# Altium footprint library WR-PHD_Socket Header.PcbLib: 279 footprints (part 14 of 18)
Each footprint in its own frame and in the unit in brackets; x right, y up, seen from the top. Pads: shape width x height; smd on the part's side, far side on the other; paste and mask are expansions set on the pad; w line width, h text height; cw(c..) or ccw(c..) is an arc to the next point about the centre after c.
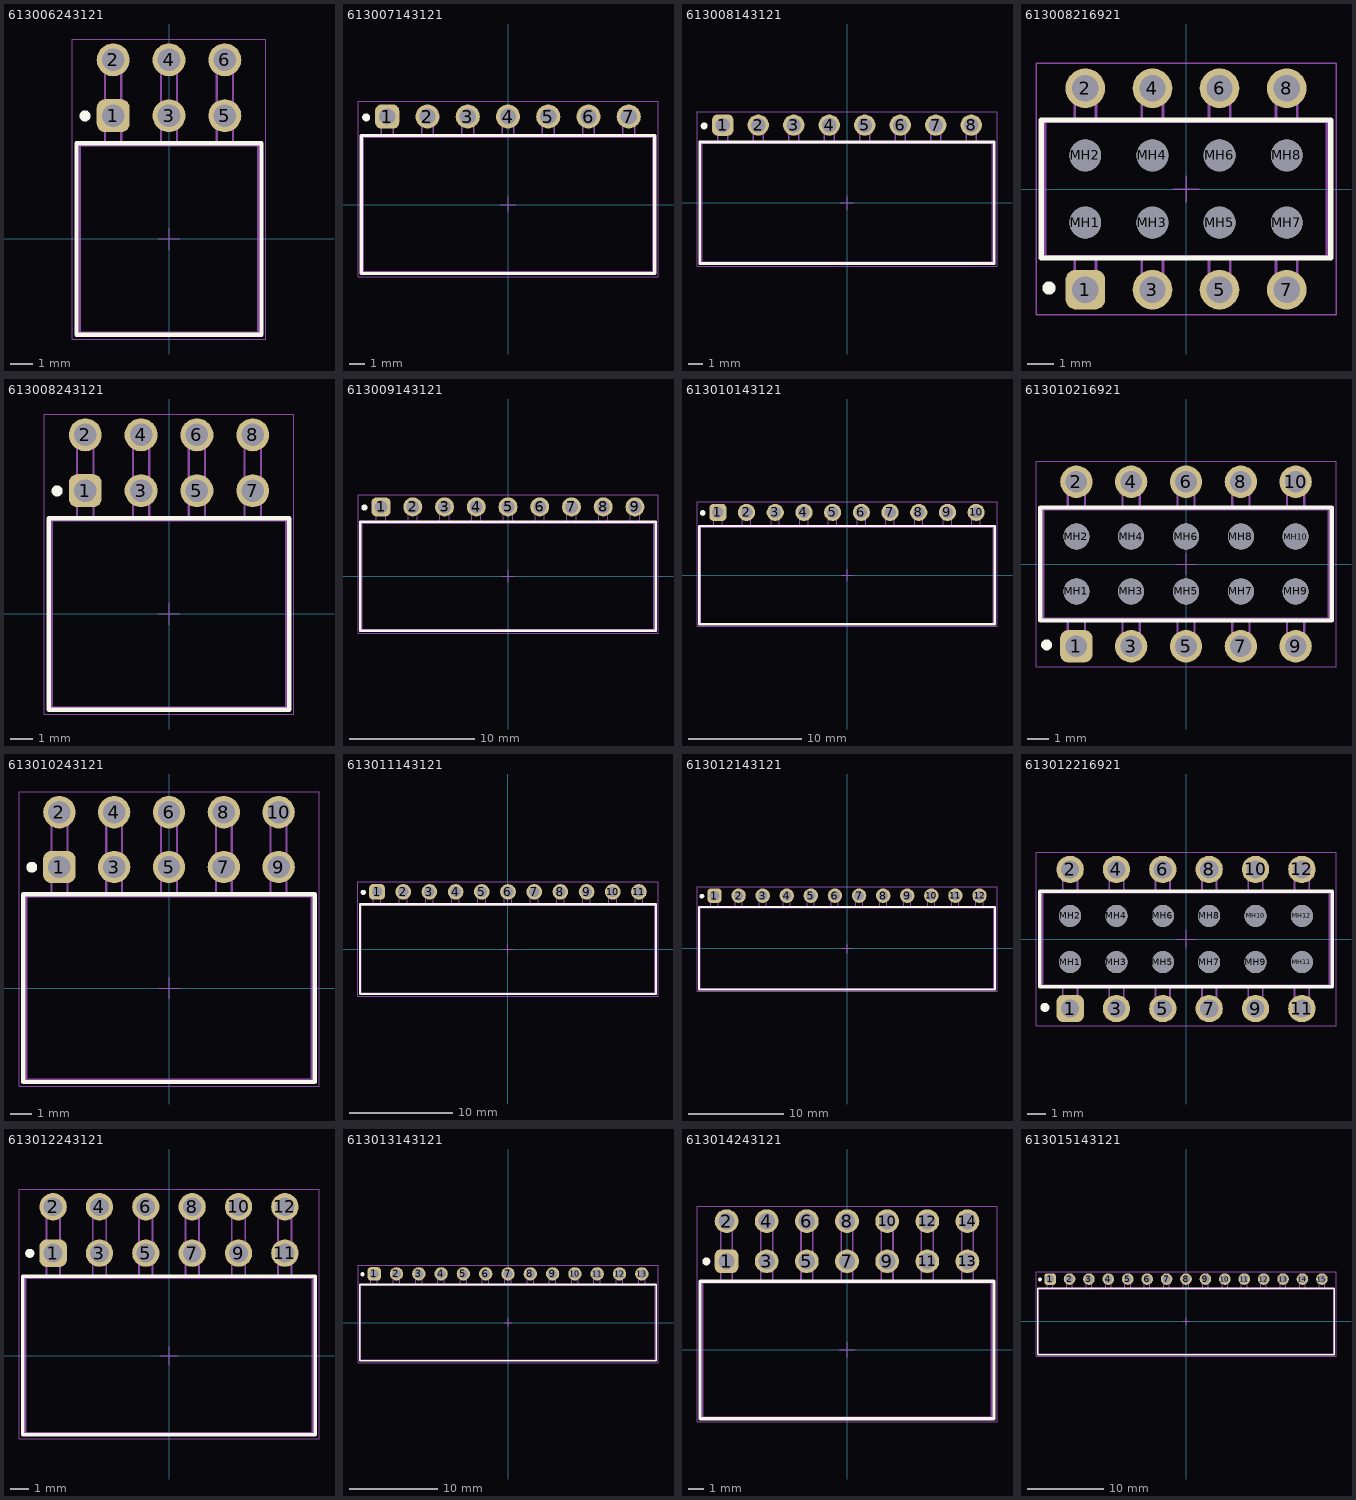
[diagram p13: the footprints below, top view; thin cyan lines are the x and y axes]

## 613006243121 [mm] "Socket Header, Pitch 2.54 mm, THT, Angled, dual row, 6p"
height 5.08
pads (6):
  rrect50% 1.5x1.5 hole 1.03: 1(-2.54,5.61)
  round 1.5 hole 1.03: 2(-2.54,8.15) 3(0,5.61) 4(0,8.15) 5(2.54,5.61) 6(2.54,8.15)
Top Overlay:
  circle w0.25: c-3.82,5.6 r0.125
  lines w0.2: -4.21,-4.35 4.21,-4.35 4.21,4.35 -4.21,4.35 -4.21,-4.35
Top Designator:
  text ".Designator" at -7.498,-0.5 h1.5
Top Component Outline:
  lines w0.1: -2.91,4.25 -2.91,8.35 -2.17,8.35 -2.17,4.25 ; -2.91,5.81 -2.17,5.81 ; -0.37,4.25 -0.37,8.35 0.37,8.35 0.37,4.25 ; -0.37,5.81 0.37,5.81 ; 2.17,4.25 2.17,8.35 2.91,8.35 2.91,4.25 ; 2.17,5.81 2.91,5.81 ; -4.06,-4.25 -4.06,4.25 4.06,4.25 4.06,-4.25 -4.06,-4.25
Top Courtyard:
  lines w0.05: -4.41,-4.55 -4.41,9.1 4.41,9.1 4.41,-4.55 -4.41,-4.55
Top Component Center:
  lines w0.05: -0.5,0 0.5,0 ; 0,-0.5 0,0.5
3D body "613006243121.stp": height 5.05, standoff -3.25, extent -4.06,-4.25 4.06,8.35

## 613007143121 [mm] "Socket Header, Pitch 2.54 mm, THT, Angled, single row, 7p"
height 2.5
pads (7):
  rrect50% 1.52x1.52 hole 1.02: 1(-7.62,5.55)
  round 1.52 hole 1.02: 2(-5.08,5.55) 3(-2.54,5.55) 4(0,5.55) 5(2.54,5.55) 6(5.08,5.55) 7(7.62,5.55)
Top Overlay:
  circle w0.25: c-8.95,5.5 r0.125
  lines w0.2: -9.265,-4.35 -9.265,4.35 9.265,4.35 9.265,-4.35 -9.265,-4.35
Top Designator:
  text ".Designator" at -7.498,-0.5 h1.5
Top Component Outline:
  lines w0.1: -7.99,4.25 -7.99,5.75 -7.25,5.75 -7.25,4.25 ; -5.45,4.25 -5.45,5.75 -4.71,5.75 -4.71,4.25 ; -2.91,4.25 -2.91,5.75 -2.17,5.75 -2.17,4.25 ; -0.37,4.25 -0.37,5.75 0.37,5.75 0.37,4.25 ; 2.17,4.25 2.17,5.75 2.91,5.75 2.91,4.25 ; 4.71,4.25 4.71,5.75 5.45,5.75 5.45,4.25 ; 7.25,4.25 7.25,5.75 7.99,5.75 7.99,4.25 ; -9.14,-4.25 9.14,-4.25 9.14,4.25 -9.14,4.25 -9.14,-4.25
Top Courtyard:
  lines w0.05: -9.465,-4.55 9.465,-4.55 9.465,6.51 -9.465,6.51 -9.465,-4.55
Top Component Center:
  lines w0.05: -0.5,0 0.5,0 ; 0,-0.5 0,0.5
3D body "613007143121.stp": height 2.55, standoff -3.04, extent -9.14,-4.25 9.14,5.75

## 613008143121 [mm] "Socket Header, Pitch 2.54 mm, THT, Angled, single row, 18p"
height 2.5
pads (8):
  rrect50% 1.52x1.52 hole 1.02: 1(-8.89,5.55)
  round 1.52 hole 1.02: 2(-6.35,5.55) 3(-3.81,5.55) 4(-1.27,5.55) 5(1.27,5.55) 6(3.81,5.55) 7(6.35,5.55) 8(8.89,5.55)
Top Overlay:
  circle w0.25: c-10.22,5.5 r0.125
  lines w0.2: -10.535,-4.35 10.535,-4.35 10.535,4.35 -10.535,4.35 -10.535,-4.35
Top Designator:
  text ".Designator" at -7.498,-0.5 h1.5
Top Component Outline:
  lines w0.1: -9.26,4.25 -9.26,5.75 -8.52,5.75 -8.52,4.25 ; -6.72,4.25 -6.72,5.75 -5.98,5.75 -5.98,4.25 ; -4.18,4.25 -4.18,5.75 -3.44,5.75 -3.44,4.25 ; -1.64,4.25 -1.64,5.75 -0.9,5.75 -0.9,4.25 ; 0.9,4.25 0.9,5.75 1.64,5.75 1.64,4.25 ; 3.44,4.25 3.44,5.75 4.18,5.75 4.18,4.25 ; 5.98,4.25 5.98,5.75 6.72,5.75 6.72,4.25 ; 8.52,4.25 8.52,5.75 9.26,5.75 9.26,4.25 ; -10.41,-4.25 10.41,-4.25 10.41,4.25 -10.41,4.25 -10.41,-4.25
Top Courtyard:
  lines w0.05: -10.735,-4.55 -10.735,6.51 10.735,6.51 10.735,-4.55 -10.735,-4.55
Top Component Center:
  lines w0.05: -0.5,0 0.5,0 ; 0,-0.5 0,0.5
3D body "613008143121.stp": height 2.55, standoff -3.04, extent -10.41,-4.25 10.41,5.75

## 613008216921 [mm] "Socket Header, Pitch 2.54 mm, THT, Vertical, dual row, 8p"
height 5
pads (16):
  rrect50% 1.5x1.5 hole 1: 1(-3.81,-3.81)
  round 1.5 hole 1: 2(-3.81,3.81) 3(-1.27,-3.81) 4(-1.27,3.81) 5(1.27,-3.81) 6(1.27,3.81) 7(3.81,-3.81) 8(3.81,3.81)
  round 1.2 hole 1.2 unplated: MH1(-3.81,-1.27) MH2(-3.81,1.27) MH3(-1.27,-1.27) MH4(-1.27,1.27) MH5(1.27,-1.27) MH6(1.27,1.27) MH7(3.81,-1.27) MH8(3.81,1.27)
Top Overlay:
  circle w0.25: c-5.19,-3.75 r0.125
  lines w0.2: -5.48,-2.615 5.48,-2.615 5.48,2.615 -5.48,2.615 -5.48,-2.615
Top Designator:
  text ".Designator" at -7.498,-0.5 h1.5
Top Component Outline:
  lines w0.1: -4.21,-2.54 -4.21,-3.935 -3.41,-3.935 -3.41,-2.54 ; -4.21,2.54 -4.21,3.935 -3.41,3.935 -3.41,2.54 ; -1.67,-2.54 -1.67,-3.935 -0.87,-3.935 -0.87,-2.54 ; -1.67,2.54 -1.67,3.935 -0.87,3.935 -0.87,2.54 ; 0.87,-2.54 0.87,-3.935 1.67,-3.935 1.67,-2.54 ; 0.87,2.54 0.87,3.935 1.67,3.935 1.67,2.54 ; 3.41,-2.54 3.41,-3.935 4.21,-3.935 4.21,-2.54 ; 3.41,2.54 3.41,3.935 4.21,3.935 4.21,2.54 ; -5.33,-2.54 5.33,-2.54 5.33,2.54 -5.33,2.54 -5.33,-2.54
Top Courtyard:
  lines w0.05: -5.68,-4.76 5.68,-4.76 5.68,4.76 -5.68,4.76 -5.68,-4.76
Top Component Center:
  lines w0.05: -0.5,0 0.5,0 ; 0,-0.5 0,0.5
3D body "613008216921.stp": height 5.02, standoff -3.08, extent -5.33,-3.935 5.33,3.935

## 613008243121 [mm] "Socket Header, Pitch 2.54 mm, THT, Angled, dual row, 8p"
height 5.08
pads (8):
  rrect50% 1.5x1.5 hole 1.03: 1(-3.81,5.61)
  round 1.5 hole 1.03: 2(-3.81,8.15) 3(-1.27,5.61) 4(-1.27,8.15) 5(1.27,5.61) 6(1.27,8.15) 7(3.81,5.61) 8(3.81,8.15)
Top Overlay:
  circle w0.25: c-5.09,5.6 r0.125
  lines w0.2: -5.48,-4.35 5.48,-4.35 5.48,4.35 -5.48,4.35 -5.48,-4.35
Top Designator:
  text ".Designator" at -7.498,-0.5 h1.5
Top Component Outline:
  lines w0.1: -4.18,4.25 -4.18,8.35 -3.44,8.35 -3.44,4.25 ; -4.18,5.81 -3.44,5.81 ; -1.64,4.25 -1.64,8.35 -0.9,8.35 -0.9,4.25 ; -1.64,5.81 -0.9,5.81 ; 0.9,4.25 0.9,8.35 1.64,8.35 1.64,4.25 ; 0.9,5.81 1.64,5.81 ; 3.44,4.25 3.44,8.35 4.18,8.35 4.18,4.25 ; 3.44,5.81 4.18,5.81 ; -5.33,-4.25 5.33,-4.25 5.33,4.25 -5.33,4.25 -5.33,-4.25
Top Courtyard:
  lines w0.05: -5.68,-4.55 -5.68,9.1 5.68,9.1 5.68,-4.55 -5.68,-4.55
Top Component Center:
  lines w0.05: -0.5,0 0.5,0 ; 0,-0.5 0,0.5
3D body "613008243121.stp": height 5.05, standoff -3.25, extent -5.33,-4.25 5.33,8.35

## 613009143121 [mm] "Socket Header, Pitch 2.54 mm, THT, Angled, single row, 19p"
height 2.5
pads (9):
  rrect50% 1.52x1.52 hole 1.02: 1(-10.16,5.55)
  round 1.52 hole 1.02: 2(-7.62,5.55) 3(-5.08,5.55) 4(-2.54,5.55) 5(0,5.55) 6(2.54,5.55) 7(5.08,5.55) 8(7.62,5.55) 9(10.16,5.55)
Top Overlay:
  circle w0.25: c-11.49,5.5 r0.125
  lines w0.2: -11.805,-4.35 -11.805,4.35 11.805,4.35 11.805,-4.35 -11.805,-4.35
Top Designator:
  text ".Designator" at -7.498,-0.5 h1.5
Top Component Outline:
  lines w0.1: -10.53,4.25 -10.53,5.75 -9.79,5.75 -9.79,4.25 ; -7.99,4.25 -7.99,5.75 -7.25,5.75 -7.25,4.25 ; -5.45,4.25 -5.45,5.75 -4.71,5.75 -4.71,4.25 ; -2.91,4.25 -2.91,5.75 -2.17,5.75 -2.17,4.25 ; -0.37,4.25 -0.37,5.75 0.37,5.75 0.37,4.25 ; 2.17,4.25 2.17,5.75 2.91,5.75 2.91,4.25 ; 4.71,4.25 4.71,5.75 5.45,5.75 5.45,4.25 ; 7.25,4.25 7.25,5.75 7.99,5.75 7.99,4.25 ; 9.79,4.25 9.79,5.75 10.53,5.75 10.53,4.25 ; -11.68,-4.25 11.68,-4.25 11.68,4.25 -11.68,4.25 -11.68,-4.25
Top Courtyard:
  lines w0.05: -12.005,-4.55 12.005,-4.55 12.005,6.51 -12.005,6.51 -12.005,-4.55
Top Component Center:
  lines w0.05: -0.5,0 0.5,0 ; 0,-0.5 0,0.5
3D body "613009143121.stp": height 2.55, standoff -3.04, extent -11.68,-4.25 11.68,5.75

## 613010143121 [mm] "Socket Header, Pitch 2.54 mm, THT, Angled, single row, 10p"
height 2.5
pads (10):
  rrect50% 1.52x1.52 hole 1.02: 1(-11.43,5.55)
  round 1.52 hole 1.02: 2(-8.89,5.55) 3(-6.35,5.55) 4(-3.81,5.55) 5(-1.27,5.55) 6(1.27,5.55) 7(3.81,5.55) 8(6.35,5.55) 9(8.89,5.55) 10(11.43,5.55)
Top Overlay:
  circle w0.25: c-12.76,5.5 r0.125
  lines w0.2: -13.075,-4.35 13.075,-4.35 13.075,4.35 -13.075,4.35 -13.075,-4.35
Top Designator:
  text ".Designator" at -7.498,-0.5 h1.5
Top Component Outline:
  lines w0.1: -11.8,4.25 -11.8,5.75 -11.06,5.75 -11.06,4.25 ; -9.26,4.25 -9.26,5.75 -8.52,5.75 -8.52,4.25 ; -6.72,4.25 -6.72,5.75 -5.98,5.75 -5.98,4.25 ; -4.18,4.25 -4.18,5.75 -3.44,5.75 -3.44,4.25 ; -1.64,4.25 -1.64,5.75 -0.9,5.75 -0.9,4.25 ; 0.9,4.25 0.9,5.75 1.64,5.75 1.64,4.25 ; 3.44,4.25 3.44,5.75 4.18,5.75 4.18,4.25 ; 5.98,4.25 5.98,5.75 6.72,5.75 6.72,4.25 ; 8.52,4.25 8.52,5.75 9.26,5.75 9.26,4.25 ; 11.06,4.25 11.06,5.75 11.8,5.75 11.8,4.25 ; -12.95,-4.25 12.95,-4.25 12.95,4.25 -12.95,4.25 -12.95,-4.25
Top Courtyard:
  lines w0.05: -13.275,-4.55 -13.275,6.51 13.275,6.51 13.275,-4.55 -13.275,-4.55
Top Component Center:
  lines w0.05: -0.5,0 0.5,0 ; 0,-0.5 0,0.5
3D body "613010143121.stp": height 2.55, standoff -3.04, extent -12.95,-4.25 12.95,5.75

## 613010216921 [mm] "Socket Header, Pitch 2.54 mm, THT, Vertical, dual row, 10p"
height 5
pads (20):
  rrect50% 1.5x1.5 hole 1: 1(-5.08,-3.81)
  round 1.5 hole 1: 2(-5.08,3.81) 3(-2.54,-3.81) 4(-2.54,3.81) 5(0,-3.81) 6(0,3.81) 7(2.54,-3.81) 8(2.54,3.81) 9(5.08,-3.81) 10(5.08,3.81)
  round 1.2 hole 1.2 unplated: MH1(-5.08,-1.27) MH2(-5.08,1.27) MH3(-2.54,-1.27) MH4(-2.54,1.27) MH5(0,-1.27) MH6(0,1.27) MH7(2.54,-1.27) MH8(2.54,1.27) MH9(5.08,-1.27) MH10(5.08,1.27)
Top Overlay:
  circle w0.25: c-6.46,-3.75 r0.125
  lines w0.2: -6.75,-2.615 -6.75,2.615 6.75,2.615 6.75,-2.615 -6.75,-2.615
Top Designator:
  text ".Designator" at -7.498,-0.5 h1.5
Top Component Outline:
  lines w0.1: -5.48,-2.54 -5.48,-3.935 -4.68,-3.935 -4.68,-2.54 ; -5.48,2.54 -5.48,3.935 -4.68,3.935 -4.68,2.54 ; -2.94,-2.54 -2.94,-3.935 -2.14,-3.935 -2.14,-2.54 ; -2.94,2.54 -2.94,3.935 -2.14,3.935 -2.14,2.54 ; -0.4,-2.54 -0.4,-3.935 0.4,-3.935 0.4,-2.54 ; -0.4,2.54 -0.4,3.935 0.4,3.935 0.4,2.54 ; 2.14,-2.54 2.14,-3.935 2.94,-3.935 2.94,-2.54 ; 2.14,2.54 2.14,3.935 2.94,3.935 2.94,2.54 ; 4.68,-2.54 4.68,-3.935 5.48,-3.935 5.48,-2.54 ; 4.68,2.54 4.68,3.935 5.48,3.935 5.48,2.54 ; -6.6,-2.54 6.6,-2.54 6.6,2.54 -6.6,2.54 -6.6,-2.54
Top Courtyard:
  lines w0.05: -6.95,-4.76 -6.95,4.76 6.95,4.76 6.95,-4.76 -6.95,-4.76
Top Component Center:
  lines w0.05: -0.5,0 0.5,0 ; 0,-0.5 0,0.5
3D body "613010216921.stp": height 5.02, standoff -3.08, extent -6.6,-3.935 6.6,3.935

## 613010243121 [mm] "Socket Header, Pitch 2.54 mm, THT, Angled, dual row, 10p"
height 5.08
pads (10):
  rrect50% 1.5x1.5 hole 1.03: 1(-5.08,5.61)
  round 1.5 hole 1.03: 2(-5.08,8.15) 3(-2.54,5.61) 4(-2.54,8.15) 5(0,5.61) 6(0,8.15) 7(2.54,5.61) 8(2.54,8.15) 9(5.08,5.61) 10(5.08,8.15)
Top Overlay:
  circle w0.25: c-6.36,5.6 r0.125
  lines w0.2: -6.75,-4.35 6.75,-4.35 6.75,4.35 -6.75,4.35 -6.75,-4.35
Top Designator:
  text ".Designator" at -7.498,-0.5 h1.5
Top Component Outline:
  lines w0.1: -5.45,4.25 -5.45,8.35 -4.71,8.35 -4.71,4.25 ; -5.45,5.81 -4.71,5.81 ; -2.91,4.25 -2.91,8.35 -2.17,8.35 -2.17,4.25 ; -2.91,5.81 -2.17,5.81 ; -0.37,4.25 -0.37,8.35 0.37,8.35 0.37,4.25 ; -0.37,5.81 0.37,5.81 ; 2.17,4.25 2.17,8.35 2.91,8.35 2.91,4.25 ; 2.17,5.81 2.91,5.81 ; 4.71,4.25 4.71,8.35 5.45,8.35 5.45,4.25 ; 4.71,5.81 5.45,5.81 ; -6.6,-4.25 -6.6,4.25 6.6,4.25 6.6,-4.25 -6.6,-4.25
Top Courtyard:
  lines w0.05: -6.95,-4.55 -6.95,9.1 6.95,9.1 6.95,-4.55 -6.95,-4.55
Top Component Center:
  lines w0.05: -0.5,0 0.5,0 ; 0,-0.5 0,0.5
3D body "613010243121.stp": height 5.05, standoff -3.25, extent -6.6,-4.25 6.6,8.35

## 613011143121 [mm] "Socket Header, Pitch 2.54 mm, THT, Angled, single row, 11p"
height 2.5
pads (11):
  rrect50% 1.52x1.52 hole 1.02: 1(-12.7,5.55)
  round 1.52 hole 1.02: 2(-10.16,5.55) 3(-7.62,5.55) 4(-5.08,5.55) 5(-2.54,5.55) 6(0,5.55) 7(2.54,5.55) 8(5.08,5.55) 9(7.62,5.55) 10(10.16,5.55) 11(12.7,5.55)
Top Overlay:
  circle w0.25: c-14.03,5.5 r0.125
  lines w0.2: -14.345,-4.35 14.345,-4.35 14.345,4.35 -14.345,4.35 -14.345,-4.35
Top Designator:
  text ".Designator" at -7.498,-0.5 h1.5
Top Component Outline:
  lines w0.1: -13.07,4.25 -13.07,5.75 -12.33,5.75 -12.33,4.25 ; -10.53,4.25 -10.53,5.75 -9.79,5.75 -9.79,4.25 ; -7.99,4.25 -7.99,5.75 -7.25,5.75 -7.25,4.25 ; -5.45,4.25 -5.45,5.75 -4.71,5.75 -4.71,4.25 ; -2.91,4.25 -2.91,5.75 -2.17,5.75 -2.17,4.25 ; -0.37,4.25 -0.37,5.75 0.37,5.75 0.37,4.25 ; 2.17,4.25 2.17,5.75 2.91,5.75 2.91,4.25 ; 4.71,4.25 4.71,5.75 5.45,5.75 5.45,4.25 ; 7.25,4.25 7.25,5.75 7.99,5.75 7.99,4.25 ; 9.79,4.25 9.79,5.75 10.53,5.75 10.53,4.25 ; 12.33,4.25 12.33,5.75 13.07,5.75 13.07,4.25 ; -14.22,-4.25 14.22,-4.25 14.22,4.25 -14.22,4.25 -14.22,-4.25
Top Courtyard:
  lines w0.05: -14.545,-4.55 -14.545,6.51 14.545,6.51 14.545,-4.55 -14.545,-4.55
Top Component Center:
  lines w0.05: -0.5,0 0.5,0 ; 0,-0.5 0,0.5
3D body "613011143121.stp": height 2.55, standoff -3.04, extent -14.22,-4.25 14.22,5.75

## 613012143121 [mm] "Socket Header, Pitch 2.54 mm, THT, Angled, single row, 12p"
height 2.5
pads (12):
  rrect50% 1.52x1.52 hole 1.02: 1(-13.97,5.55)
  round 1.52 hole 1.02: 2(-11.43,5.55) 3(-8.89,5.55) 4(-6.35,5.55) 5(-3.81,5.55) 6(-1.27,5.55) 7(1.27,5.55) 8(3.81,5.55) 9(6.35,5.55) 10(8.89,5.55) 11(11.43,5.55) 12(13.97,5.55)
Top Overlay:
  circle w0.25: c-15.3,5.5 r0.125
  lines w0.2: -15.615,-4.35 -15.615,4.35 15.615,4.35 15.615,-4.35 -15.615,-4.35
Top Designator:
  text ".Designator" at -7.498,-0.5 h1.5
Top Component Outline:
  lines w0.1: -14.34,4.25 -14.34,5.75 -13.6,5.75 -13.6,4.25 ; -11.8,4.25 -11.8,5.75 -11.06,5.75 -11.06,4.25 ; -9.26,4.25 -9.26,5.75 -8.52,5.75 -8.52,4.25 ; -6.72,4.25 -6.72,5.75 -5.98,5.75 -5.98,4.25 ; -4.18,4.25 -4.18,5.75 -3.44,5.75 -3.44,4.25 ; -1.64,4.25 -1.64,5.75 -0.9,5.75 -0.9,4.25 ; 0.9,4.25 0.9,5.75 1.64,5.75 1.64,4.25 ; 3.44,4.25 3.44,5.75 4.18,5.75 4.18,4.25 ; 5.98,4.25 5.98,5.75 6.72,5.75 6.72,4.25 ; 8.52,4.25 8.52,5.75 9.26,5.75 9.26,4.25 ; 11.06,4.25 11.06,5.75 11.8,5.75 11.8,4.25 ; 13.6,4.25 13.6,5.75 14.34,5.75 14.34,4.25 ; -15.49,-4.25 15.49,-4.25 15.49,4.25 -15.49,4.25 -15.49,-4.25
Top Courtyard:
  lines w0.05: -15.815,-4.55 15.815,-4.55 15.815,6.51 -15.815,6.51 -15.815,-4.55
Top Component Center:
  lines w0.05: -0.5,0 0.5,0 ; 0,-0.5 0,0.5
3D body "613012143121.stp": height 2.55, standoff -3.04, extent -15.49,-4.25 15.49,5.75

## 613012216921 [mm] "Socket Header, Pitch 2.54 mm, THT, Vertical, dual row, 12p"
height 5
pads (24):
  rrect50% 1.5x1.5 hole 1: 1(-6.35,-3.81)
  round 1.5 hole 1: 2(-6.35,3.81) 3(-3.81,-3.81) 4(-3.81,3.81) 5(-1.27,-3.81) 6(-1.27,3.81) 7(1.27,-3.81) 8(1.27,3.81) 9(3.81,-3.81) 10(3.81,3.81) 11(6.35,-3.81) 12(6.35,3.81)
  round 1.2 hole 1.2 unplated: MH1(-6.35,-1.27) MH2(-6.35,1.27) MH3(-3.81,-1.27) MH4(-3.81,1.27) MH5(-1.27,-1.27) MH6(-1.27,1.27) MH7(1.27,-1.27) MH8(1.27,1.27) MH9(3.81,-1.27) MH10(3.81,1.27) MH11(6.35,-1.27) MH12(6.35,1.27)
Top Overlay:
  circle w0.25: c-7.73,-3.75 r0.125
  lines w0.2: -8.02,-2.615 -8.02,2.615 8.02,2.615 8.02,-2.615 -8.02,-2.615
Top Designator:
  text ".Designator" at -7.498,-0.5 h1.5
Top Component Outline:
  lines w0.1: -6.75,-2.54 -6.75,-3.935 -5.95,-3.935 -5.95,-2.54 ; -6.75,2.54 -6.75,3.935 -5.95,3.935 -5.95,2.54 ; -4.21,-2.54 -4.21,-3.935 -3.41,-3.935 -3.41,-2.54 ; -4.21,2.54 -4.21,3.935 -3.41,3.935 -3.41,2.54 ; -1.67,-2.54 -1.67,-3.935 -0.87,-3.935 -0.87,-2.54 ; -1.67,2.54 -1.67,3.935 -0.87,3.935 -0.87,2.54 ; 0.87,-2.54 0.87,-3.935 1.67,-3.935 1.67,-2.54 ; 0.87,2.54 0.87,3.935 1.67,3.935 1.67,2.54 ; 3.41,-2.54 3.41,-3.935 4.21,-3.935 4.21,-2.54 ; 3.41,2.54 3.41,3.935 4.21,3.935 4.21,2.54 ; 5.95,-2.54 5.95,-3.935 6.75,-3.935 6.75,-2.54 ; 5.95,2.54 5.95,3.935 6.75,3.935 6.75,2.54 ; -7.87,-2.54 -7.87,2.54 7.87,2.54 7.87,-2.54 -7.87,-2.54
Top Courtyard:
  lines w0.05: -8.22,-4.76 -8.22,4.76 8.22,4.76 8.22,-4.76 -8.22,-4.76
Top Component Center:
  lines w0.05: -0.5,0 0.5,0 ; 0,-0.5 0,0.5
3D body "613012216921.stp": height 5.02, standoff -3.08, extent -7.87,-3.935 7.87,3.935

## 613012243121 [mm] "Socket Header, Pitch 2.54 mm, THT, Angled, dual row, 12p"
height 5.08
pads (12):
  rrect50% 1.5x1.5 hole 1.03: 1(-6.35,5.61)
  round 1.5 hole 1.03: 2(-6.35,8.15) 3(-3.81,5.61) 4(-3.81,8.15) 5(-1.27,5.61) 6(-1.27,8.15) 7(1.27,5.61) 8(1.27,8.15) 9(3.81,5.61) 10(3.81,8.15) 11(6.35,5.61) 12(6.35,8.15)
Top Overlay:
  circle w0.25: c-7.63,5.6 r0.125
  lines w0.2: -8.02,-4.35 -8.02,4.35 8.02,4.35 8.02,-4.35 -8.02,-4.35
Top Designator:
  text ".Designator" at -7.498,-0.5 h1.5
Top Component Outline:
  lines w0.1: -6.72,4.25 -6.72,8.35 -5.98,8.35 -5.98,4.25 ; -6.72,5.81 -5.98,5.81 ; -4.18,4.25 -4.18,8.35 -3.44,8.35 -3.44,4.25 ; -4.18,5.81 -3.44,5.81 ; -1.64,4.25 -1.64,8.35 -0.9,8.35 -0.9,4.25 ; -1.64,5.81 -0.9,5.81 ; 0.9,4.25 0.9,8.35 1.64,8.35 1.64,4.25 ; 0.9,5.81 1.64,5.81 ; 3.44,4.25 3.44,8.35 4.18,8.35 4.18,4.25 ; 3.44,5.81 4.18,5.81 ; 5.98,4.25 5.98,8.35 6.72,8.35 6.72,4.25 ; 5.98,5.81 6.72,5.81 ; -7.87,-4.25 -7.87,4.25 7.87,4.25 7.87,-4.25 -7.87,-4.25
Top Courtyard:
  lines w0.05: -8.22,-4.55 8.22,-4.55 8.22,9.1 -8.22,9.1 -8.22,-4.55
Top Component Center:
  lines w0.05: -0.5,0 0.5,0 ; 0,-0.5 0,0.5
3D body "613012243121.stp": height 5.05, standoff -3.25, extent -7.87,-4.25 7.87,8.35

## 613013143121 [mm] "Socket Header, Pitch 2.54 mm, THT, Angled, single row, 13p"
height 2.5
pads (13):
  rrect50% 1.52x1.52 hole 1.02: 1(-15.24,5.55)
  round 1.52 hole 1.02: 2(-12.7,5.55) 3(-10.16,5.55) 4(-7.62,5.55) 5(-5.08,5.55) 6(-2.54,5.55) 7(0,5.55) 8(2.54,5.55) 9(5.08,5.55) 10(7.62,5.55) 11(10.16,5.55) 12(12.7,5.55) 13(15.24,5.55)
Top Overlay:
  circle w0.25: c-16.57,5.5 r0.125
  lines w0.2: -16.885,-4.35 -16.885,4.35 16.885,4.35 16.885,-4.35 -16.885,-4.35
Top Designator:
  text ".Designator" at -7.498,-0.5 h1.5
Top Component Outline:
  lines w0.1: -15.61,4.25 -15.61,5.75 -14.87,5.75 -14.87,4.25 ; -13.07,4.25 -13.07,5.75 -12.33,5.75 -12.33,4.25 ; -10.53,4.25 -10.53,5.75 -9.79,5.75 -9.79,4.25 ; -7.99,4.25 -7.99,5.75 -7.25,5.75 -7.25,4.25 ; -5.45,4.25 -5.45,5.75 -4.71,5.75 -4.71,4.25 ; -2.91,4.25 -2.91,5.75 -2.17,5.75 -2.17,4.25 ; -0.37,4.25 -0.37,5.75 0.37,5.75 0.37,4.25 ; 2.17,4.25 2.17,5.75 2.91,5.75 2.91,4.25 ; 4.71,4.25 4.71,5.75 5.45,5.75 5.45,4.25 ; 7.25,4.25 7.25,5.75 7.99,5.75 7.99,4.25 ; 9.79,4.25 9.79,5.75 10.53,5.75 10.53,4.25 ; 12.33,4.25 12.33,5.75 13.07,5.75 13.07,4.25 ; 14.87,4.25 14.87,5.75 15.61,5.75 15.61,4.25 ; -16.76,-4.25 -16.76,4.25 16.76,4.25 16.76,-4.25 -16.76,-4.25
Top Courtyard:
  lines w0.05: -17.085,-4.55 17.085,-4.55 17.085,6.51 -17.085,6.51 -17.085,-4.55
Top Component Center:
  lines w0.05: -0.5,0 0.5,0 ; 0,-0.5 0,0.5
3D body "613013143121.stp": height 2.55, standoff -3.04, extent -16.76,-4.25 16.26,5.75

## 613014243121 [mm] "Socket Header, Pitch 2.54 mm, THT, Angled, dual row, 14p"
height 5.08
pads (14):
  rrect50% 1.5x1.5 hole 1.03: 1(-7.62,5.61)
  round 1.5 hole 1.03: 2(-7.62,8.15) 3(-5.08,5.61) 4(-5.08,8.15) 5(-2.54,5.61) 6(-2.54,8.15) 7(0,5.61) 8(0,8.15) 9(2.54,5.61) 10(2.54,8.15) 11(5.08,5.61) 12(5.08,8.15) 13(7.62,5.61) 14(7.62,8.15)
Top Overlay:
  circle w0.25: c-8.9,5.6 r0.125
  lines w0.2: -9.29,-4.35 9.29,-4.35 9.29,4.35 -9.29,4.35 -9.29,-4.35
Top Designator:
  text ".Designator" at -7.498,-0.5 h1.5
Top Component Outline:
  lines w0.1: -7.99,4.25 -7.99,8.35 -7.25,8.35 -7.25,4.25 ; -7.99,5.81 -7.25,5.81 ; -5.45,4.25 -5.45,8.35 -4.71,8.35 -4.71,4.25 ; -5.45,5.81 -4.71,5.81 ; -2.91,4.25 -2.91,8.35 -2.17,8.35 -2.17,4.25 ; -2.91,5.81 -2.17,5.81 ; -0.37,4.25 -0.37,8.35 0.37,8.35 0.37,4.25 ; -0.37,5.81 0.37,5.81 ; 2.17,4.25 2.17,8.35 2.91,8.35 2.91,4.25 ; 2.17,5.81 2.91,5.81 ; 4.71,4.25 4.71,8.35 5.45,8.35 5.45,4.25 ; 4.71,5.81 5.45,5.81 ; 7.25,4.25 7.25,8.35 7.99,8.35 7.99,4.25 ; 7.25,5.81 7.99,5.81 ; -9.14,-4.25 -9.14,4.25 9.14,4.25 9.14,-4.25 -9.14,-4.25
Top Courtyard:
  lines w0.05: -9.49,-4.55 -9.49,9.1 9.49,9.1 9.49,-4.55 -9.49,-4.55
Top Component Center:
  lines w0.05: -0.5,0 0.5,0 ; 0,-0.5 0,0.5
3D body "613014243121.stp": height 5.05, standoff -3.25, extent -9.14,-4.25 9.14,8.35

## 613015143121 [mm] "Socket Header, Pitch 2.54 mm, THT, Angled, single row, 15p"
height 2.5
pads (15):
  rrect50% 1.52x1.52 hole 1.02: 1(-17.78,5.55)
  round 1.52 hole 1.02: 2(-15.24,5.55) 3(-12.7,5.55) 4(-10.16,5.55) 5(-7.62,5.55) 6(-5.08,5.55) 7(-2.54,5.55) 8(0,5.55) 9(2.54,5.55) 10(5.08,5.55) 11(7.62,5.55) 12(10.16,5.55) 13(12.7,5.55) 14(15.24,5.55) 15(17.78,5.55)
Top Overlay:
  circle w0.25: c-19.11,5.5 r0.125
  lines w0.2: -19.425,-4.35 19.425,-4.35 19.425,4.35 -19.425,4.35 -19.425,-4.35
Top Designator:
  text ".Designator" at -7.498,-0.5 h1.5
Top Component Outline:
  lines w0.1: -18.15,4.25 -18.15,5.75 -17.41,5.75 -17.41,4.25 ; -15.61,4.25 -15.61,5.75 -14.87,5.75 -14.87,4.25 ; -13.07,4.25 -13.07,5.75 -12.33,5.75 -12.33,4.25 ; -10.53,4.25 -10.53,5.75 -9.79,5.75 -9.79,4.25 ; -7.99,4.25 -7.99,5.75 -7.25,5.75 -7.25,4.25 ; -5.45,4.25 -5.45,5.75 -4.71,5.75 -4.71,4.25 ; -2.91,4.25 -2.91,5.75 -2.17,5.75 -2.17,4.25 ; -0.37,4.25 -0.37,5.75 0.37,5.75 0.37,4.25 ; 2.17,4.25 2.17,5.75 2.91,5.75 2.91,4.25 ; 4.71,4.25 4.71,5.75 5.45,5.75 5.45,4.25 ; 7.25,4.25 7.25,5.75 7.99,5.75 7.99,4.25 ; 9.79,4.25 9.79,5.75 10.53,5.75 10.53,4.25 ; 12.33,4.25 12.33,5.75 13.07,5.75 13.07,4.25 ; 14.87,4.25 14.87,5.75 15.61,5.75 15.61,4.25 ; 17.41,4.25 17.41,5.75 18.15,5.75 18.15,4.25 ; -19.3,-4.25 19.3,-4.25 19.3,4.25 -19.3,4.25 -19.3,-4.25
Top Courtyard:
  lines w0.05: -19.625,-4.55 -19.625,6.51 19.625,6.51 19.625,-4.55 -19.625,-4.55
Top Component Center:
  lines w0.05: -0.5,0 0.5,0 ; 0,-0.5 0,0.5
3D body "613015143121.stp": height 2.55, standoff -3.04, extent -19.3,-4.25 19.3,5.75